# Altium footprint library Grant_..PcbLib: 73 footprints (part 3 of 5)
Each footprint in its own frame and in the unit in brackets; x right, y up, seen from the top. Pads: shape width x height; smd on the part's side, far side on the other; paste and mask are expansions set on the pad; w line width, h text height; cw(c..) or ccw(c..) is an arc to the next point about the centre after c.
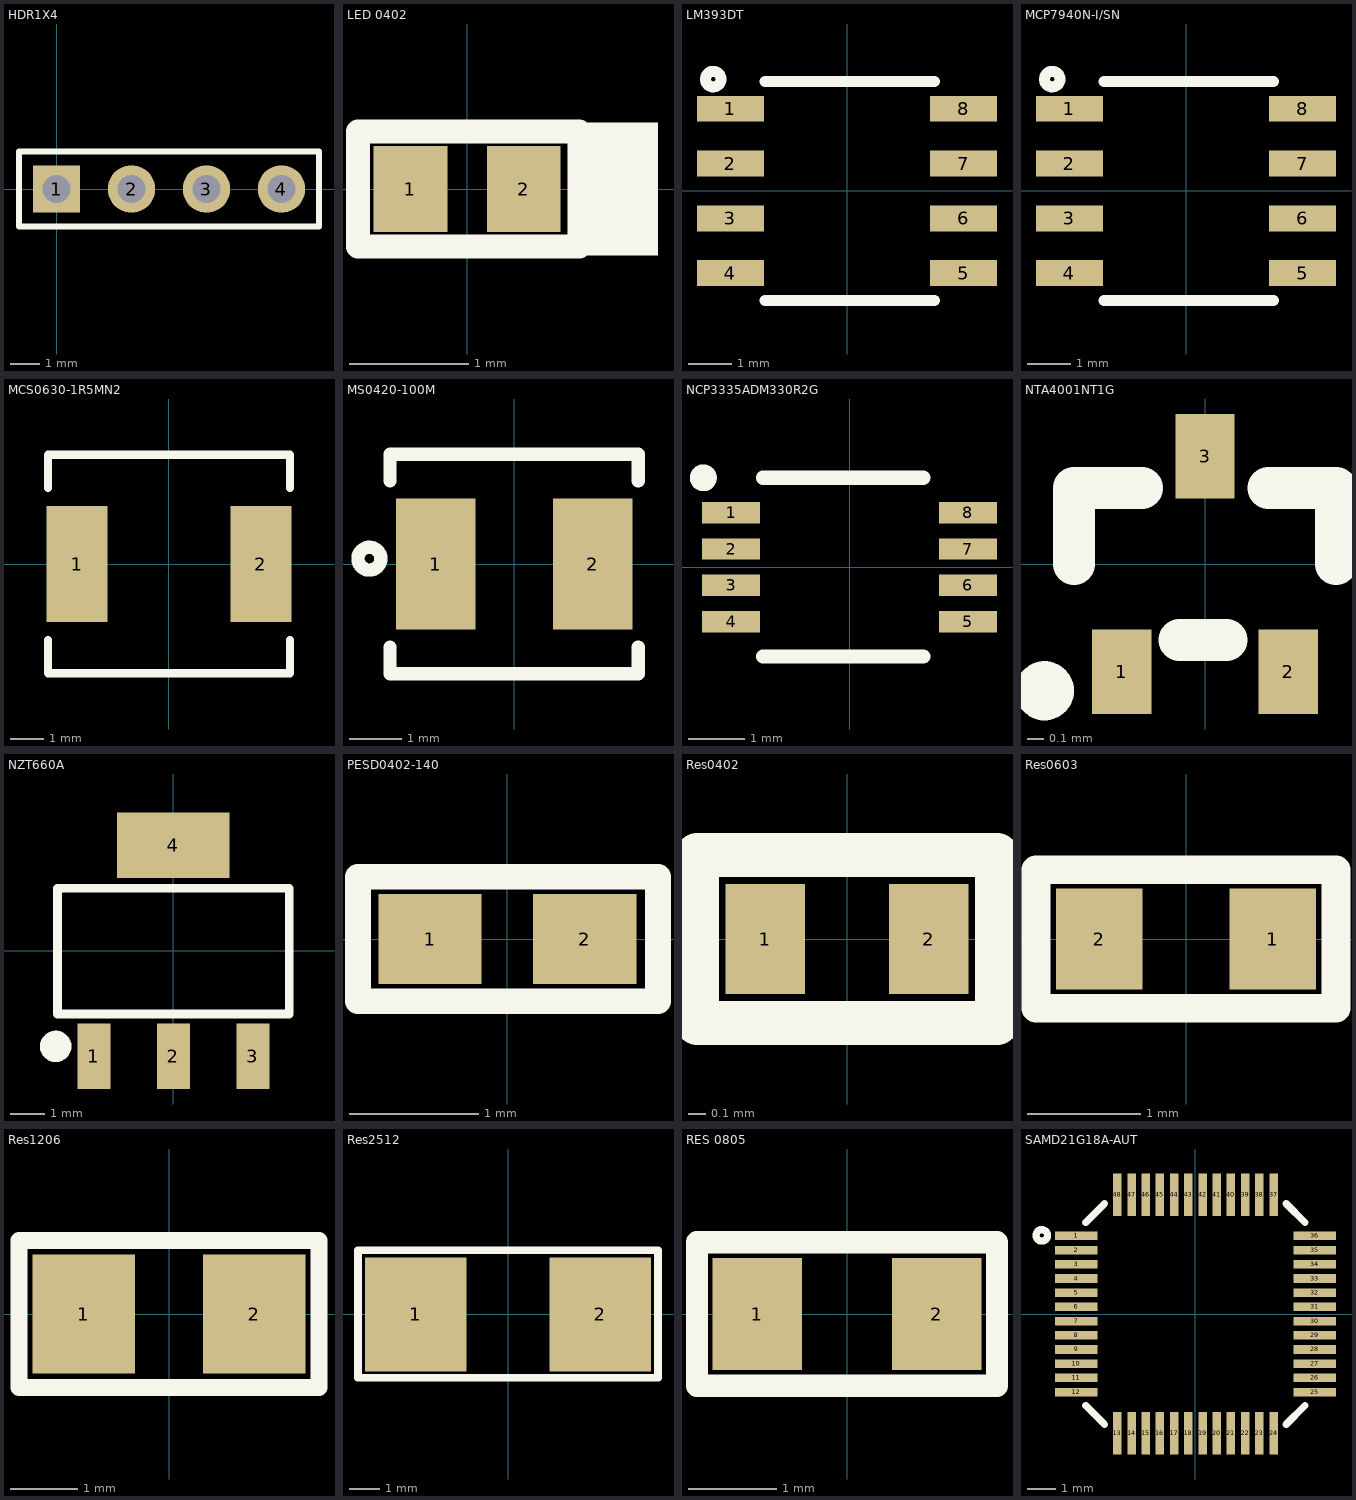
[diagram p2: the footprints below, top view; thin cyan lines are the x and y axes]

## HDR1X4 [mm] "Connector; Header; 4 Position"
pads (4):
  rect 1.6x1.6 hole 0.95: 1(0,0)
  round 1.6 hole 0.95: 2(2.54,0) 3(5.08,0) 4(7.62,0)
Top Overlay:
  lines w0.2: -1.27,-1.27 -1.27,1.27 8.89,1.27 8.89,-1.27 -1.27,-1.27
3D body "User Library-1x4 TH Pitch 2_54mm.STEP": height 9.5, standoff -3.2, extent -1.27,-1.27 8.89,1.27

## LED 0402 [mm]
pads (2):
  rect 0.62x0.72 smd: 1(-0.475,0) 2(0.475,0)
Top Overlay:
  rectangle: 0.94,-0.559 1.6,0.559
  lines w0.2: -0.914,-0.483 -0.914,0.483 0.94,0.483 0.94,-0.483 -0.914,-0.483
3D body "User Library-LED-0402.step": height 0.45, standoff 0, extent -0.505,-0.25 0.505,0.25

## LM393DT [mm]
pads (8):
  rect 1.55x0.6 smd: 1(-2.7,1.905) 2(-2.7,0.635) 3(-2.7,-0.635) 4(-2.7,-1.905) 5(2.7,-1.905) 6(2.7,-0.635) 7(2.7,0.635) 8(2.7,1.905)
Top Overlay:
  circle w0.254: c-3.099,2.591 r0.18
  lines w0.254: -1.905,-2.54 2.032,-2.54 ; -1.905,2.54 2.032,2.54
3D body "User Library-SOIC-8-1.STEP": height 1.65, standoff -0.1, extent -2.906,-2.413 3.094,2.487

## MCP7940N-I/SN [mm]
pads (8):
  rect 1.55x0.6 smd: 1(-2.7,1.905) 2(-2.7,0.635) 3(-2.7,-0.635) 4(-2.7,-1.905) 5(2.7,-1.905) 6(2.7,-0.635) 7(2.7,0.635) 8(2.7,1.905)
Top Overlay:
  circle w0.254: c-3.099,2.591 r0.18
  lines w0.254: -1.905,-2.54 2.032,-2.54 ; -1.905,2.54 2.032,2.54
3D body "User Library-SOIC-8-1.STEP": height 1.65, standoff -0.1, extent -2.906,-2.413 3.094,2.487

## MCS0630-1R5MN2 [mm]
pads (2):
  rect 1.85x3.5 smd: 1(-2.775,0) 2(2.775,0)
Top Overlay:
  lines w0.254: -3.65,-2.294 -3.65,-3.3 0,-3.3 3.65,-3.3 3.65,-2.294 ; -3.65,2.294 -3.65,3.3 0,3.3 3.65,3.3 3.65,2.294
3D body "mcs0630.stp": height 3, standoff 0, extent -3.65,-3.3 3.65,3.3

## MS0420-100M [mm]
pads (2):
  rect 1.52x2.5 smd: 1(-1.5,0) 2(1.5,0)
Top Overlay:
  circle w0.254: c-2.769,0.102 r0.218
  lines w0.254: -2.375,-1.588 -2.375,-2.1 0,-2.1 2.375,-2.1 2.375,-1.588 ; -2.375,1.588 -2.375,2.1 0,2.1 2.375,2.1 2.375,1.588

## NCP3335ADM330R2G [mm]
pads (8):
  rect 1.04x0.38 smd: 1(-2.12,0.975) 2(-2.12,0.325) 3(-2.12,-0.325) 4(-2.12,-0.975) 5(2.12,-0.975) 6(2.12,-0.325) 7(2.12,0.325) 8(2.12,0.975)
Top Overlay:
  circle w0.254: c-2.616,1.6 r0.114
  lines w0.254: -1.549,-1.6 1.321,-1.6 ; -1.549,1.6 1.321,1.6
3D body "User Library-MSOP-8 MSOP-8L.step": height 1.01, standoff 0, extent -2.46,-1.525 2.46,1.525

## NTA4001NT1G [mil]
pads (3):
  rect 14.02x20 smd: 1(-19.68,-25.49) 2(19.69,-25.49) 3(0,25.49)
Top Overlay:
  circle w10: c-38,-30 r2
  lines w10: -31,0 -31,18 -15,18 ; -6,-18 5,-18 ; 15,18 31,18 31,0
3D body "User Library-SOT-416.step": height 30.62, standoff -0.88, extent -31.49,-31.49 31.5,31.5

## NZT660A [mm]
pads (4):
  rect 0.95x1.9 smd: 1(-2.3,-3.05) 2(0,-3.05) 3(2.3,-3.05)
  rect 3.25x1.9 smd: 4(0,3.05)
Top Overlay:
  circle w0.5: c-3.404,-2.769 r0.203
  lines w0.254: -3.353,-1.829 3.353,-1.829 3.353,1.803 -3.353,1.803 -3.353,-1.829
3D body "User Library-SOT-223-1.step": height 1.61, standoff -0.04, extent -3.25,-3.5 3.25,3.5

## PESD0402-140 [mm]
pads (2):
  rect 0.8x0.7 smd: 1(-0.6,0) 2(0.6,0)
Top Overlay:
  lines w0.2: -1.159,-0.483 1.168,-0.483 1.168,0.483 -1.159,0.483 -1.159,-0.483
3D body "pesd0402-140.stp": height 0.39, standoff -0.03, extent -0.55,-0.3 0.55,0.3

## Res0402 [mil]
pads (2):
  rect 18x25 smd: 1(-18.5,0) 2(18.5,0)
Top Overlay:
  lines w10: -34,-19 34,-19 34,19 -34,19 -34,-19
3D body "User Library-RES_1005-0402.step": height 16.14, standoff 0, extent -22.63,-10.82 22.64,10.83

## Res0603 [mil]
pads (2):
  rect 30x35 smd: 1(30,0) 2(-30,0)
Top Overlay:
  lines w10: -52,-24 -52,24 52,24 52,-24 -52,-24
3D body "User Library-RESC1608X05N.step": height 17.76, standoff 0, extent -30.51,-16.73 30.52,16.74

## Res1206 [mil]
pads (2):
  rect 60x70 smd: 1(-50,0) 2(50,0)
Top Overlay:
  lines w10: -88,-43 -88,43 88,43 88,-43 -88,-43
3D body "User Library-1206 SMD Resistor.step": height 39.45, standoff 0, extent -62.99,-31.49 63,31.51

## Res2512 [mm]
pads (2):
  rect 3.3x3.7 smd: 1(-3,0) 2(3,0)
Top Overlay:
  lines w0.254: -4.877,-2.057 -4.877,2.083 4.877,2.083 4.877,-2.057 -4.877,-2.057
3D body "User Library-2512 SMD Resistor.step": height 1.6, standoff 0, extent -3.099,-1.5 3.251,1.5

## RES 0805 [mil] "SMD 0805"
pads (2):
  rect 40x50 smd: 1(-40,0) 2(40,0)
Top Overlay:
  lines w10: -67,-32 -67,32 67,32 67,-32 -67,-32
3D body "User Library-CR2012-0805.STEP": height 23.62, standoff 0, extent -39.34,-24.75 39.4,24.46

## SAMD21G18A-AUT [mm] "IC MCU 32BIT 256KB FLASH 48TQFP"
pads (48):
  rect 1.5x0.3 smd: 1(-4.2,2.75) 2(-4.2,2.25) 3(-4.2,1.75) 4(-4.2,1.25) 5(-4.2,0.75) 6(-4.2,0.25) 7(-4.2,-0.25) 8(-4.2,-0.75) 9(-4.2,-1.25) 10(-4.2,-1.75) 11(-4.2,-2.25) 12(-4.2,-2.75) 25(4.2,-2.75) 26(4.2,-2.25) 27(4.2,-1.75) 28(4.2,-1.25) 29(4.2,-0.75) 30(4.2,-0.25) 31(4.2,0.25) 32(4.2,0.75) 33(4.2,1.25) 34(4.2,1.75) 35(4.2,2.25) 36(4.2,2.75)
  rect 0.3x1.5 smd: 13(-2.75,-4.2) 14(-2.25,-4.2) 15(-1.75,-4.2) 16(-1.25,-4.2) 17(-0.75,-4.2) 18(-0.25,-4.2) 19(0.25,-4.2) 20(0.75,-4.2) 21(1.25,-4.2) 22(1.75,-4.2) 23(2.25,-4.2) 24(2.75,-4.2) 37(2.75,4.2) 38(2.25,4.2) 39(1.75,4.2) 40(1.25,4.2) 41(0.75,4.2) 42(0.25,4.2) 43(-0.25,4.2) 44(-0.75,4.2) 45(-1.25,4.2) 46(-1.75,4.2) 47(-2.25,4.2) 48(-2.75,4.2)
Top Overlay:
  circle w0.254: c-5.41,2.769 r0.203
  lines w0.254: -3.861,-3.226 -3.2,-3.886 ; -3.861,3.226 -3.2,3.886 ; 3.2,-3.886 3.861,-3.226 ; 3.2,3.886 3.861,3.226
3D body "User Library-TQFP-48.STEP": height 1.42, standoff -0.04, extent -4.5,-4.504 4.5,4.496